# Altium schematic symbol library Vibration_Datalogger.SchLib: 75 symbols (part 7 of 7)
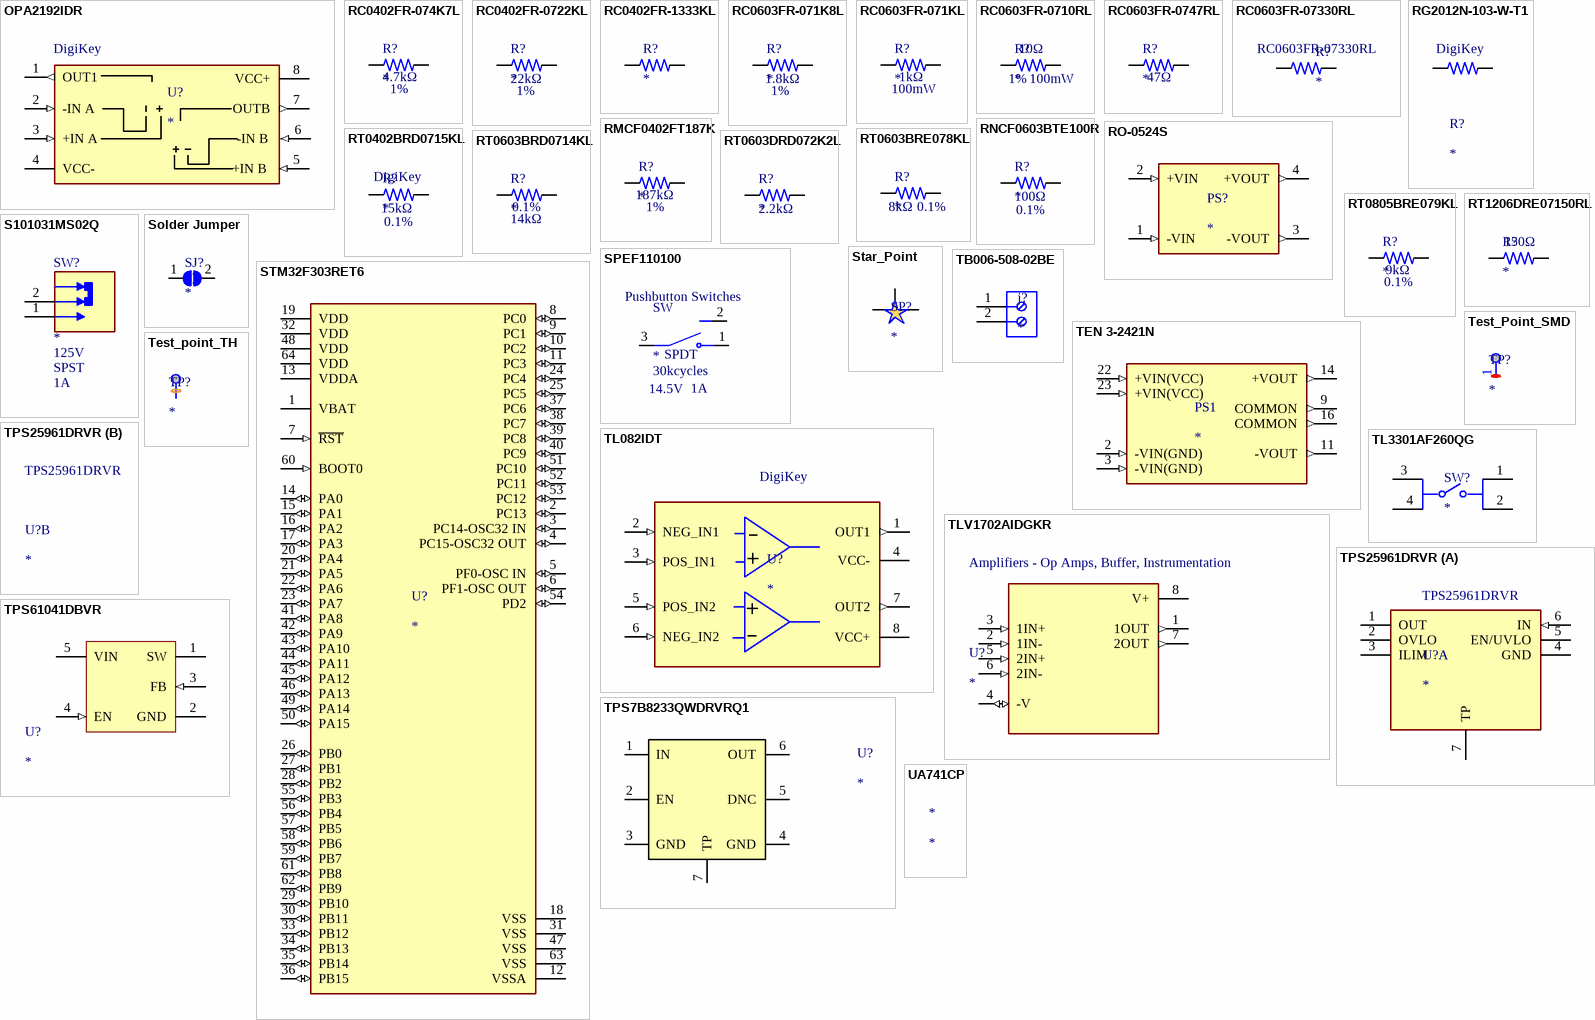
[diagram p7: symbols OPA2192IDR to UA741CP]

## TLV1702AIDGKR
designator U?  Category: Amplifiers - Op Amps, Buffer, Instrumentation
Dual high voltage, low power comparator 8-VSSOP -40 to 125; Manufacturer Lifecycle Status: ACTIVE; Manufacturer: Texas Instruments; Manufacturer Part Number: TLV1702AIDGKR; Input Bias Current: 5nA; Input Offset Voltage (Vos): 500µV; Max Dual Supply Voltage: 18V; Max Input Current: 15nA; Max Junction Temperature (Tj): 150°C; Max Supply Voltage: 36V; Min Dual Supply Voltage: 1.1V; Min Supply Voltage: 2.2V; Nominal Supply Current: 55µA; Number of Channels: 2; Output Current: 20mA; Power Supply Rejection Ratio (PSRR): -96.48dB; Propagation Delay: 560ns; Quiescent Current: 75µA; Response Time: 780ns; Case/Package: VSSOP; Contact Plating: Gold, Silver; Height: 0m; Lead Free: Lead Free; Length: 3mm; Lifecycle Status: Production; Max Operating Temperature: 125°C; Min Operating Temperature: -40°C; Mount: Surface Mount; Number of Elements: 2; Number of Pins: 8; REACH SVHC: No; Schedule B: 8542390000, 8542390000|8542390000|8542390000|8542390000|8542390000|8542390000|8542390000|8542390000|8542390000|8542390000|8542390000|8542390000|8542390000|8542390000|8542390000|8542390000|8542390000|8542390000|8542390000|8542390000|8542390000|8542390000|8542390000|85; Thickness: 970µm; Type: General Purpose; Width: 3mm; ComponentLink1URL: https://sigma.octopart.com:443/178522223/technical_drawing/Texas-Instruments-TLV1702AIDGKR.pdf?src-supplier=Texas+Instruments; ComponentLink1Description: https://sigma.octopart.com:443/178522223/technical_drawing/Texas-Instruments-TLV1702AIDGKR.pdf?src-supplier=Texas+Instruments; ComponentLink2URL: https://octopart.com:443/opatz8j6/c1?t=iUaDZ-roroNCIkqhQWv481ZQhiF8nH3-hn0LhaP1ZkZhWb0ADq8d21KKoeXJAMhbDkTgPtXMcxPelJe7xmMcY3d8WOArPCvBD_CUDe98PeZzwIcJTAEO9QVrhY-wSCJLAyyKxEq_36_Jt6W9QKfV9tz-7JohwOIdPAcSF3qzmsqi29B08OhjiuU5AfCzN1A5u4SaLfV4xJOvorKTzgC3yuPazlCMruIP3GdvfBkPZKAH6DndcCKd1cwEkO599W7mIbsDlu8FlknlULDCKD5i6KonTEJfSLepJHYEgx4vVHjyxHkPkY-yJx7bnKvsyxO69ltH3DeBKHoo2qdhi6O-3z2GBnwoXNw5nBGCkfBeUnjnVFnxqD0vAPUpFnV2UOdJtoDqpNs&src-supplier=Texas+Instruments; ComponentLink2Description: https://octopart.com:443/opatz8j6/c1?t=iUaDZ-roroNCIkqhQWv481ZQhiF8nH3-hn0LhaP1ZkZhWb0ADq8d21KKoeXJAMhbDkTgPtXMcxPelJe7xmMcY3d8WOArPCvBD_CUDe98PeZzwIcJTAEO9QVrhY-wSCJLAyyKxEq_36_Jt6W9QKfV9tz-7JohwOIdPAcSF3qzmsqi29B08OhjiuU5AfCzN1A5u4SaLfV4xJOvorKTzgC3yuPazlCMruIP3GdvfBkPZKAH6DndcCKd1cwEkO599W7mIbsDlu8FlknlULDCKD5i6KonTEJfSLepJHYEgx4vVHjyxHkPkY-yJx7bnKvsyxO69ltH3DeBKHoo2qdhi6O-3z2GBnwoXNw5nBGCkfBeUnjnVFnxqD0vAPUpFnV2UOdJtoDqpNs&src-supplier=Texas+Instruments; ComponentLink3URL: https://datasheet.octopart.com:443/TLV1702AIDGKR-Texas-Instruments-datasheet-41217926.pdf?src-supplier=Texas+Instruments; ComponentLink3Description: https://datasheet.octopart.com:443/TLV1702AIDGKR-Texas-Instruments-datasheet-41217926.pdf?src-supplier=Texas+Instruments; ComponentLink4URL: https://datasheet.octopart.com:443/TLV1702AIDGKR-Texas-Instruments-datasheet-34154349.pdf?src-supplier=Texas+Instruments; ComponentLink4Description: https://datasheet.octopart.com:443/TLV1702AIDGKR-Texas-Instruments-datasheet-34154349.pdf?src-supplier=Texas+Instruments; ComponentLink5URL: https://datasheet.octopart.com:443/TLV1702AIDGKR-Texas-Instruments-datasheet-32736893.pdf?src-supplier=Texas+Instruments; ComponentLink5Description: https://datasheet.octopart.com:443/TLV1702AIDGKR-Texas-Instruments-datasheet-32736893.pdf?src-supplier=Texas+Instruments; ComponentLink6URL: https://datasheet.octopart.com:443/TLV1702AIDGKR-Texas-Instruments-datasheet-32015743.pdf?src-supplier=Texas+Instruments; ComponentLink6Description: https://datasheet.octopart.com:443/TLV1702AIDGKR-Texas-Instruments-datasheet-32015743.pdf?src-supplier=Texas+Instruments; ComponentLink7URL: https://datasheet.octopart.com:443/TLV1702AIDGKR-Texas-Instruments-datasheet-21256581.pdf?src-supplier=Texas+Instruments; ComponentLink7Description: https://datasheet.octopart.com:443/TLV1702AIDGKR-Texas-Instruments-datasheet-21256581.pdf?src-supplier=Texas+Instruments; ComponentLink8URL: https://sigma.octopart.com:443/49250154/technical_drawing/Texas-Instruments-TLV1702AIDGKR.pdf?src-supplier=Texas+Instruments; ComponentLink8Description: https://sigma.octopart.com:443/49250154/technical_drawing/Texas-Instruments-TLV1702AIDGKR.pdf?src-supplier=Texas+Instruments; ComponentLink9URL: https://datasheet.octopart.com:443/TLV1702AIDGKR-Texas-Instruments-datasheet-147835657.pdf?src-supplier=Upverter; ComponentLink9Description: https://datasheet.octopart.com:443/TLV1702AIDGKR-Texas-Instruments-datasheet-147835657.pdf?src-supplier=Upverter; ComponentLink10URL: https://datasheet.octopart.com:443/TLV1702AIDGKR-Texas-Instruments-datasheet-66581735.pdf?src-supplier=Newark; ComponentLink10Description: https://datasheet.octopart.com:443/TLV1702AIDGKR-Texas-Instruments-datasheet-66581735.pdf?src-supplier=Newark; ComponentLink11URL: https://datasheet.octopart.com:443/TLV1702AIDGKR-Texas-Instruments-datasheet-33012491.pdf?src-supplier=Newark; ComponentLink11Description: https://datasheet.octopart.com:443/TLV1702AIDGKR-Texas-Instruments-datasheet-33012491.pdf?src-supplier=Newark; ComponentLink12URL: https://datasheet.octopart.com:443/TLV1702AIDGKR-Texas-Instruments-datasheet-49588982.pdf?src-supplier=element14+APAC; ComponentLink12Description: https://datasheet.octopart.com:443/TLV1702AIDGKR-Texas-Instruments-datasheet-49588982.pdf?src-supplier=element14+APAC; ComponentLink13URL: https://datasheet.octopart.com:443/TLV1702AIDGKR-Texas-Instruments-datasheet-37140355.pdf?src-supplier=element14+APAC; ComponentLink13Description: https://datasheet.octopart.com:443/TLV1702AIDGKR-Texas-Instruments-datasheet-37140355.pdf?src-supplier=element14+APAC; ComponentLink14URL: https://datasheet.octopart.com:443/TLV1702AIDGKR-Texas-Instruments-datasheet-140571703.pdf?src-supplier=Arrow.cn; ComponentLink14Description: https://datasheet.octopart.com:443/TLV1702AIDGKR-Texas-Instruments-datasheet-140571703.pdf?src-supplier=Arrow.cn; ComponentLink15URL: https://datasheet.octopart.com:443/TLV1702AIDGKR-Texas-Instruments-datasheet-83188854.pdf?src-supplier=TME; ComponentLink15Description: https://datasheet.octopart.com:443/TLV1702AIDGKR-Texas-Instruments-datasheet-83188854.pdf?src-supplier=TME; ComponentLink16URL: http://sigma.octopart.com:80/reach_statement/Texas-Instruments-company-64.pdf?src-supplier=Compliance+Statements; ComponentLink16Description: http://sigma.octopart.com:80/reach_statement/Texas-Instruments-company-64.pdf?src-supplier=Compliance+Statements; ComponentLink17URL: http://sigma.octopart.com:80/conflict_mineral_statement/Texas-Instruments-company-63.pdf?src-supplier=Compliance+Statements; ComponentLink17Description: http://sigma.octopart.com:80/conflict_mineral_statement/Texas-Instruments-company-63.pdf?src-supplier=Compliance+Statements; Supplier 1: DigiKey; Supplier Part Number 1: 296-37236-1-ND
footprint TLV1702AIDGKR (IC COMPARATOR 2CH 8-VSSOP)
pins: 1 1OUT (out), 2 1IN- (in), 3 1IN+ (in), 4 -V (io), 5 2IN+ (in), 6 2IN- (in), 7 2OUT (out), 8 V+ (power)

## TPS7B8233QWDRVRQ1
designator U?
Automotive 300-mA, off-battery (40-V); Manufacturer Lifecycle Status: ACTIVE; Height: 800µm; Length: 2mm; Lifecycle Status: Production; Number of Pins: 6; Thickness: 750µm; Width: 2mm; ComponentLink1URL: https://octopart.com:443/opatz8j6/c1?t=7WSiqJunUI9PIgH4jquUaBZ0plxXeUuqYMIPiF3Fcq2ByK__oXuosoh3mTagRzsU4agXS4_UEROCi43alXdyG2a5hYo9-HG_-7X6kM4r6qj9wp7KdzS2C1Vmd9Ir5QWmeBQS-5NT3OlSg48qqFkngutyYdPK2ycNM9N52tSI-HUKm2h_zSeQewzbAIKyX1a4E_EF_w0K0VgOFf-574NeTyVLxAkzIKiRGI-2MsPoZkbg6c0ISr3inrqLNKDuytzNxSijH2pgjYuFKlNzqyrZ4zZhF9z6BiGuo0zDncjw1a8TyHWSFf_A30hHC09PYNw30vrLfKP2-2k4ZPSiKQLAJsQn9K0t10BVvaBPy7E6j06zM4Lupep1NpchOOxXVFjw1iOiQ3VzQ5l2&src-supplier=Texas+Instruments; ComponentLink1Description: https://octopart.com:443/opatz8j6/c1?t=7WSiqJunUI9PIgH4jquUaBZ0plxXeUuqYMIPiF3Fcq2ByK__oXuosoh3mTagRzsU4agXS4_UEROCi43alXdyG2a5hYo9-HG_-7X6kM4r6qj9wp7KdzS2C1Vmd9Ir5QWmeBQS-5NT3OlSg48qqFkngutyYdPK2ycNM9N52tSI-HUKm2h_zSeQewzbAIKyX1a4E_EF_w0K0VgOFf-574NeTyVLxAkzIKiRGI-2MsPoZkbg6c0ISr3inrqLNKDuytzNxSijH2pgjYuFKlNzqyrZ4zZhF9z6BiGuo0zDncjw1a8TyHWSFf_A30hHC09PYNw30vrLfKP2-2k4ZPSiKQLAJsQn9K0t10BVvaBPy7E6j06zM4Lupep1NpchOOxXVFjw1iOiQ3VzQ5l2&src-supplier=Texas+Instruments; ComponentLink2URL: http://sigma.octopart.com:80/reach_statement/Texas-Instruments-company-64.pdf?src-supplier=Compliance+Statements; ComponentLink2Description: http://sigma.octopart.com:80/reach_statement/Texas-Instruments-company-64.pdf?src-supplier=Compliance+Statements; ComponentLink3URL: http://sigma.octopart.com:80/conflict_mineral_statement/Texas-Instruments-company-63.pdf?src-supplier=Compliance+Statements; ComponentLink3Description: http://sigma.octopart.com:80/conflict_mineral_statement/Texas-Instruments-company-63.pdf?src-supplier=Compliance+Statements
footprint TPS7B8233QWDRVRQ1 (AUTOMOTIVE 300-MA, OFF-BATTERY ()
pins: 1 IN (power), 2 EN, 3 GND, 4 GND, 5 DNC, 6 OUT (power), 7 TP (power)

## TPS25961DRVR
designator U?  Manufacturer Part Number: TPS25961DRVR
2.7-V TO 19-V 100-M EFUSE WITH O; Manufacturer Lifecycle Status: ACTIVE; Manufacturer: Texas Instruments; Height: 800µm; Length: 2mm; Lifecycle Status: Production; Number of Pins: 6; Thickness: 750µm; Width: 2mm; ComponentLink1URL: https://octopart.com:443/opatz8j6/c1?t=S1xkJqIgFHoRAs614Sh_f7mDPqY7n-9g1CVa4cNi5hxx6g81t8padSBjg378zsPx6m8IwrYaHi_RuHHS21coeVQCG3OxsLdcu6lzfAPU48-dyrvk4_ASk2QRBurpyuabN2jgAu76qrWKpaNbvEDSpOfD9CHua-RjlsRQwE5NGihYh6lU7KWDTs2xfTKoO0KOZB2pCRcjwk9NKxuG5vtAjT0Cx9vbluxsxBt5EiWrL8zHsz4VK5ehUOpKD3pUvdaCDW2TUYzUcGjzIwsfOe_OcwxBHByljdTQNEQqxSW97k3uNZ3rjtL21G73W6U59wTNDYHWdyWMBiSPwAoe43ZHRhsDoItLFKopzT7Ap-yvRHOtwgVqoKwa7xdY_lMZ9kctMjWSG-4I&src-supplier=Texas+Instruments; ComponentLink1Description: https://octopart.com:443/opatz8j6/c1?t=S1xkJqIgFHoRAs614Sh_f7mDPqY7n-9g1CVa4cNi5hxx6g81t8padSBjg378zsPx6m8IwrYaHi_RuHHS21coeVQCG3OxsLdcu6lzfAPU48-dyrvk4_ASk2QRBurpyuabN2jgAu76qrWKpaNbvEDSpOfD9CHua-RjlsRQwE5NGihYh6lU7KWDTs2xfTKoO0KOZB2pCRcjwk9NKxuG5vtAjT0Cx9vbluxsxBt5EiWrL8zHsz4VK5ehUOpKD3pUvdaCDW2TUYzUcGjzIwsfOe_OcwxBHByljdTQNEQqxSW97k3uNZ3rjtL21G73W6U59wTNDYHWdyWMBiSPwAoe43ZHRhsDoItLFKopzT7Ap-yvRHOtwgVqoKwa7xdY_lMZ9kctMjWSG-4I&src-supplier=Texas+Instruments; ComponentLink2URL: http://sigma.octopart.com:80/reach_statement/Texas-Instruments-company-64.pdf?src-supplier=Compliance+Statements; ComponentLink2Description: http://sigma.octopart.com:80/reach_statement/Texas-Instruments-company-64.pdf?src-supplier=Compliance+Statements; ComponentLink3URL: http://sigma.octopart.com:80/conflict_mineral_statement/Texas-Instruments-company-63.pdf?src-supplier=Compliance+Statements; ComponentLink3Description: http://sigma.octopart.com:80/conflict_mineral_statement/Texas-Instruments-company-63.pdf?src-supplier=Compliance+Statements; Supplier 1: DigiKey; Supplier Part Number 1: 296-TPS25961DRVRCT-ND; Category: Hot Swap Controllers
footprint TPS25961DRVR (2.7-V TO 19-V 100-M EFUSE WITH O)
part A pins: 1 OUT (power), 2 OVLO, 3 ILIM, 4 GND, 5 EN/UVLO, 6 IN (in), 7 TP

## TPS61041DBVR
designator U?
IC LED DRVR RGLTR PWM SOT23-5; Manufacturer Lifecycle Status: ACTIVE; Efficiency: 85%; Frequency: 1MHz; High Level Output Current: 50mA; Max Input Voltage: 6V; Max Output Voltage: 28V; Max Supply Current: 50µA; Min Input Voltage: 1.8V; Number of Channels: 1; Output Current: 250mA; Output Power: 357mW; Output Type: Adjustable; Quiescent Current: 28µA; Topology: Boost; Case/Package: SOT-23; Height: 1.45mm; Lead Free: Lead Free; Length: 2.9mm; Lifecycle Status: Production; Max Operating Temperature: 85°C; Max Output Current: 50mA; Max Supply Voltage: 6V; Min Operating Temperature: -40°C; Min Output Voltage: 1.8V; Min Supply Voltage: 1.8V; Nominal Input Voltage: 6V; Number of Outputs: 1; Number of Pins: 5; Output Voltage: 28V; Packaging: Cut Tape; Radiation Hardening: No; REACH SVHC: No; Schedule B: 8542390000, 8542390000|8542390000|8542390000|8542390000|8542390000; Switching Frequency: 1MHz; Termination: SMD/SMT; Thickness: 1.2mm; Weight: 13.012431mg; Width: 1.6mm; ComponentLink1URL: https://sigma.octopart.com:443/177332311/technical_drawing/Texas-Instruments-TPS61041DBVR.pdf?src-supplier=Texas+Instruments; ComponentLink1Description: https://sigma.octopart.com:443/177332311/technical_drawing/Texas-Instruments-TPS61041DBVR.pdf?src-supplier=Texas+Instruments; ComponentLink2URL: https://octopart.com:443/opatz8j6/c1?t=k3wc_2YAHre9aEKvrtUL4WiH_7gyz5vvYIpgl3-_DoieH9_J--UOA_4swiipad8nwfdCqRPE7cAU4y7fXoWH5s6gY_OEZpDmt4BRm_vJuqCU6_G0QTbABtNIj9X3Wk4rNKXV0JPXgFqA4mKESAibKFXCpnwvyJyx-23z5q8y4uzBqg0JgwBOXenSBHlC9K7HJNs8eSKIWkGQ0JIBH81RxiwzCGA96NNC9jBkZo0lS8D4_ep_iqgTZ6YmA3U9-nDW1JxenI6HkSB-BibaSeiW2gkfclnyBbKiNZExXKpJZUM-3bb4z0zpDkNUz1E0CZwEhr9E5_3q7KKvBqOAVMCAxqghPF0D-78aDMoSTVOHvFhBGbArx7jxUefcD653syxCxtR4QA&src-supplier=Texas+Instruments; ComponentLink2Description: https://octopart.com:443/opatz8j6/c1?t=k3wc_2YAHre9aEKvrtUL4WiH_7gyz5vvYIpgl3-_DoieH9_J--UOA_4swiipad8nwfdCqRPE7cAU4y7fXoWH5s6gY_OEZpDmt4BRm_vJuqCU6_G0QTbABtNIj9X3Wk4rNKXV0JPXgFqA4mKESAibKFXCpnwvyJyx-23z5q8y4uzBqg0JgwBOXenSBHlC9K7HJNs8eSKIWkGQ0JIBH81RxiwzCGA96NNC9jBkZo0lS8D4_ep_iqgTZ6YmA3U9-nDW1JxenI6HkSB-BibaSeiW2gkfclnyBbKiNZExXKpJZUM-3bb4z0zpDkNUz1E0CZwEhr9E5_3q7KKvBqOAVMCAxqghPF0D-78aDMoSTVOHvFhBGbArx7jxUefcD653syxCxtR4QA&src-supplier=Texas+Instruments; ComponentLink3URL: https://datasheet.octopart.com:443/TPS61041DBVR-Texas-Instruments-datasheet-37140377.pdf?src-supplier=Texas+Instruments; ComponentLink3Description: https://datasheet.octopart.com:443/TPS61041DBVR-Texas-Instruments-datasheet-37140377.pdf?src-supplier=Texas+Instruments; ComponentLink4URL: https://sigma.octopart.com:443/175570406/technical_drawing/Texas-Instruments-TPS61041DBVR.pdf?src-supplier=Texas+Instruments; ComponentLink4Description: https://sigma.octopart.com:443/175570406/technical_drawing/Texas-Instruments-TPS61041DBVR.pdf?src-supplier=Texas+Instruments; ComponentLink5URL: https://sigma.octopart.com:443/169406034/technical_drawing/Texas-Instruments-TPS61041DBVR.pdf?src-supplier=Texas+Instruments; ComponentLink5Description: https://sigma.octopart.com:443/169406034/technical_drawing/Texas-Instruments-TPS61041DBVR.pdf?src-supplier=Texas+Instruments; ComponentLink6URL: https://sigma.octopart.com:443/155939316/technical_drawing/Texas-Instruments-TPS61041DBVR.pdf?src-supplier=Texas+Instruments; ComponentLink6Description: https://sigma.octopart.com:443/155939316/technical_drawing/Texas-Instruments-TPS61041DBVR.pdf?src-supplier=Texas+Instruments; ComponentLink7URL: https://sigma.octopart.com:443/102331370/technical_drawing/Texas-Instruments-TPS61041DBVR.pdf?src-supplier=Texas+Instruments; ComponentLink7Description: https://sigma.octopart.com:443/102331370/technical_drawing/Texas-Instruments-TPS61041DBVR.pdf?src-supplier=Texas+Instruments; ComponentLink8URL: https://datasheet.octopart.com:443/TPS61041DBVR-Texas-Instruments-datasheet-34157400.pdf?src-supplier=Texas+Instruments; ComponentLink8Description: https://datasheet.octopart.com:443/TPS61041DBVR-Texas-Instruments-datasheet-34157400.pdf?src-supplier=Texas+Instruments; ComponentLink9URL: https://sigma.octopart.com:443/49249325/technical_drawing/Texas-Instruments-TPS61041DBVR.pdf?src-supplier=Texas+Instruments; ComponentLink9Description: https://sigma.octopart.com:443/49249325/technical_drawing/Texas-Instruments-TPS61041DBVR.pdf?src-supplier=Texas+Instruments; ComponentLink10URL: https://datasheet.octopart.com:443/TPS61041DBVR-Texas-Instruments-datasheet-10256988.pdf?src-supplier=Texas+Instruments; ComponentLink10Description: https://datasheet.octopart.com:443/TPS61041DBVR-Texas-Instruments-datasheet-10256988.pdf?src-supplier=Texas+Instruments; ComponentLink11URL: https://datasheet.octopart.com:443/TPS61041DBVR-Texas-Instruments-datasheet-150964.pdf?src-supplier=Farnell; ComponentLink11Description: https://datasheet.octopart.com:443/TPS61041DBVR-Texas-Instruments-datasheet-150964.pdf?src-supplier=Farnell; ComponentLink12URL: https://datasheet.octopart.com:443/TPS61041DBVR-Texas-Instruments-datasheet-13549163.pdf?src-supplier=Upverter; ComponentLink12Description: https://datasheet.octopart.com:443/TPS61041DBVR-Texas-Instruments-datasheet-13549163.pdf?src-supplier=Upverter; ComponentLink13URL: https://datasheet.octopart.com:443/TPS61041DBVR-Texas-Instruments-datasheet-66617810.pdf?src-supplier=Newark; ComponentLink13Description: https://datasheet.octopart.com:443/TPS61041DBVR-Texas-Instruments-datasheet-66617810.pdf?src-supplier=Newark; ComponentLink14URL: https://datasheet.octopart.com:443/TPS61041DBVR-Texas-Instruments-datasheet-5394864.pdf?src-supplier=Newark; ComponentLink14Description: https://datasheet.octopart.com:443/TPS61041DBVR-Texas-Instruments-datasheet-5394864.pdf?src-supplier=Newark; ComponentLink15URL: https://datasheet.octopart.com:443/TPS61041DBVR-Texas-Instruments-datasheet-33019193.pdf?src-supplier=Newark; ComponentLink15Description: https://datasheet.octopart.com:443/TPS61041DBVR-Texas-Instruments-datasheet-33019193.pdf?src-supplier=Newark; ComponentLink16URL: https://datasheet.octopart.com:443/TPS61041DBVR-Texas-Instruments-datasheet-28738.pdf?src-supplier=Newark; ComponentLink16Description: https://datasheet.octopart.com:443/TPS61041DBVR-Texas-Instruments-datasheet-28738.pdf?src-supplier=Newark; ComponentLink17URL: https://datasheet.octopart.com:443/TPS61041DBVR-Texas-Instruments-datasheet-165804802.pdf?src-supplier=LCSC; ComponentLink17Description: https://datasheet.octopart.com:443/TPS61041DBVR-Texas-Instruments-datasheet-165804802.pdf?src-supplier=LCSC; ComponentLink18URL: https://datasheet.octopart.com:443/TPS61041DBVR-Texas-Instruments-datasheet-159118170.pdf?src-supplier=LCSC; ComponentLink18Description: https://datasheet.octopart.com:443/TPS61041DBVR-Texas-Instruments-datasheet-159118170.pdf?src-supplier=LCSC; ComponentLink19URL: https://datasheet.octopart.com:443/TPS61041DBVR-Texas-Instruments-datasheet-137316104.pdf?src-supplier=Future+Electronics; ComponentLink19Description: https://datasheet.octopart.com:443/TPS61041DBVR-Texas-Instruments-datasheet-137316104.pdf?src-supplier=Future+Electronics; ComponentLink20URL: https://datasheet.octopart.com:443/TPS61041DBVR-Texas-Instruments-datasheet-17023098.pdf?src-supplier=Factory+Futures; ComponentLink20Description: https://datasheet.octopart.com:443/TPS61041DBVR-Texas-Instruments-datasheet-17023098.pdf?src-supplier=Factory+Futures; ComponentLink21URL: https://datasheet.octopart.com:443/TPS61041DBVR-Texas-Instruments-datasheet-14155781.pdf?src-supplier=iiiC; ComponentLink21Description: https://datasheet.octopart.com:443/TPS61041DBVR-Texas-Instruments-datasheet-14155781.pdf?src-supplier=iiiC; ComponentLink22URL: https://datasheet.octopart.com:443/TPS61041DBVR-Texas-Instruments-datasheet-8716823.pdf?src-supplier=element14; ComponentLink22Description: https://datasheet.octopart.com:443/TPS61041DBVR-Texas-Instruments-datasheet-8716823.pdf?src-supplier=element14; ComponentLink23URL: https://datasheet.octopart.com:443/TPS61041DBVR-Texas-Instruments-datasheet-8444271.pdf?src-supplier=Jameco; ComponentLink23Description: https://datasheet.octopart.com:443/TPS61041DBVR-Texas-Instruments-datasheet-8444271.pdf?src-supplier=Jameco; ComponentLink24URL: https://datasheet.octopart.com:443/TPS61041DBVR-Texas-Instruments-datasheet-112971.pdf?src-supplier=Sierra+IC; ComponentLink24Description: https://datasheet.octopart.com:443/TPS61041DBVR-Texas-Instruments-datasheet-112971.pdf?src-supplier=Sierra+IC; ComponentLink25URL: https://datasheet.octopart.com:443/TPS61041DBVR-Texas-Instruments-datasheet-46314.pdf?src-supplier=DigiKey; ComponentLink25Description: https://datasheet.octopart.com:443/TPS61041DBVR-Texas-Instruments-datasheet-46314.pdf?src-supplier=DigiKey; ComponentLink26URL: http://sigma.octopart.com:80/reach_statement/Texas-Instruments-company-64.pdf?src-supplier=Compliance+Statements; ComponentLink26Description: http://sigma.octopart.com:80/reach_statement/Texas-Instruments-company-64.pdf?src-supplier=Compliance+Statements; ComponentLink27URL: http://sigma.octopart.com:80/conflict_mineral_statement/Texas-Instruments-company-63.pdf?src-supplier=Compliance+Statements; ComponentLink27Description: http://sigma.octopart.com:80/conflict_mineral_statement/Texas-Instruments-company-63.pdf?src-supplier=Compliance+Statements; Supplier 1: DigiKey
footprint TPS61041DBVR (IC LED DRVR RGLTR PWM SOT23-5)
pins: 1 SW (power) "Connect the inductor and the Schottky diode to this pin. This is the switch pin and is connected to the drain of the internal power MOSFET.", 2 GND (power) "Ground", 3 FB (in) "This is the feedback pin of the device. Connect this pin to the external voltage divider to program the desired output voltage.", 4 EN (in) "This is the enable pin of the device. Pulling this pin to ground forces the device into shutdown mode reducing the supply current to less than 1 uA. This pin should not be left floating and needs to be terminated.", 5 VIN (power) "Supply voltage pin"

## UA741CP
designator *